# Altium integrated library DB207S.IntLib: 1 symbol
Pins are listed as number, name and electrical type; pins without a type are passive.

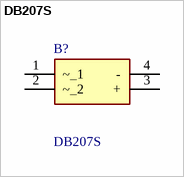
[diagram p0: symbol DB207S]

## DB207S
designator B?
HY Electronic Corp DB207S, Common Anode, Common Cathode Bridge Rectifier, 2A 1000V, 4-Pin DBS; Geometry.Height: 3.75mm; Manufacturer_Name: HY Electronic; Manufacturer_Part_Number: DB207S; Mouser Part Number: *; Mouser Price/Stock: *; Arrow Part Number: *; Arrow Price/Stock: *; Datasheet Link: http://uk.rs-online.com/web/p/products/9178969P
footprint SOP510P1015X375-4N
pins: 1 ~_1, 2 ~_2, 3 +, 4 -